# Altium footprint library aksima_footprint.PcbLib: 56 footprints (part 2 of 4)
Each footprint in its own frame and in the unit in brackets; x right, y up, seen from the top. Pads: shape width x height; smd on the part's side, far side on the other; paste and mask are expansions set on the pad; w line width, h text height; cw(c..) or ccw(c..) is an arc to the next point about the centre after c.
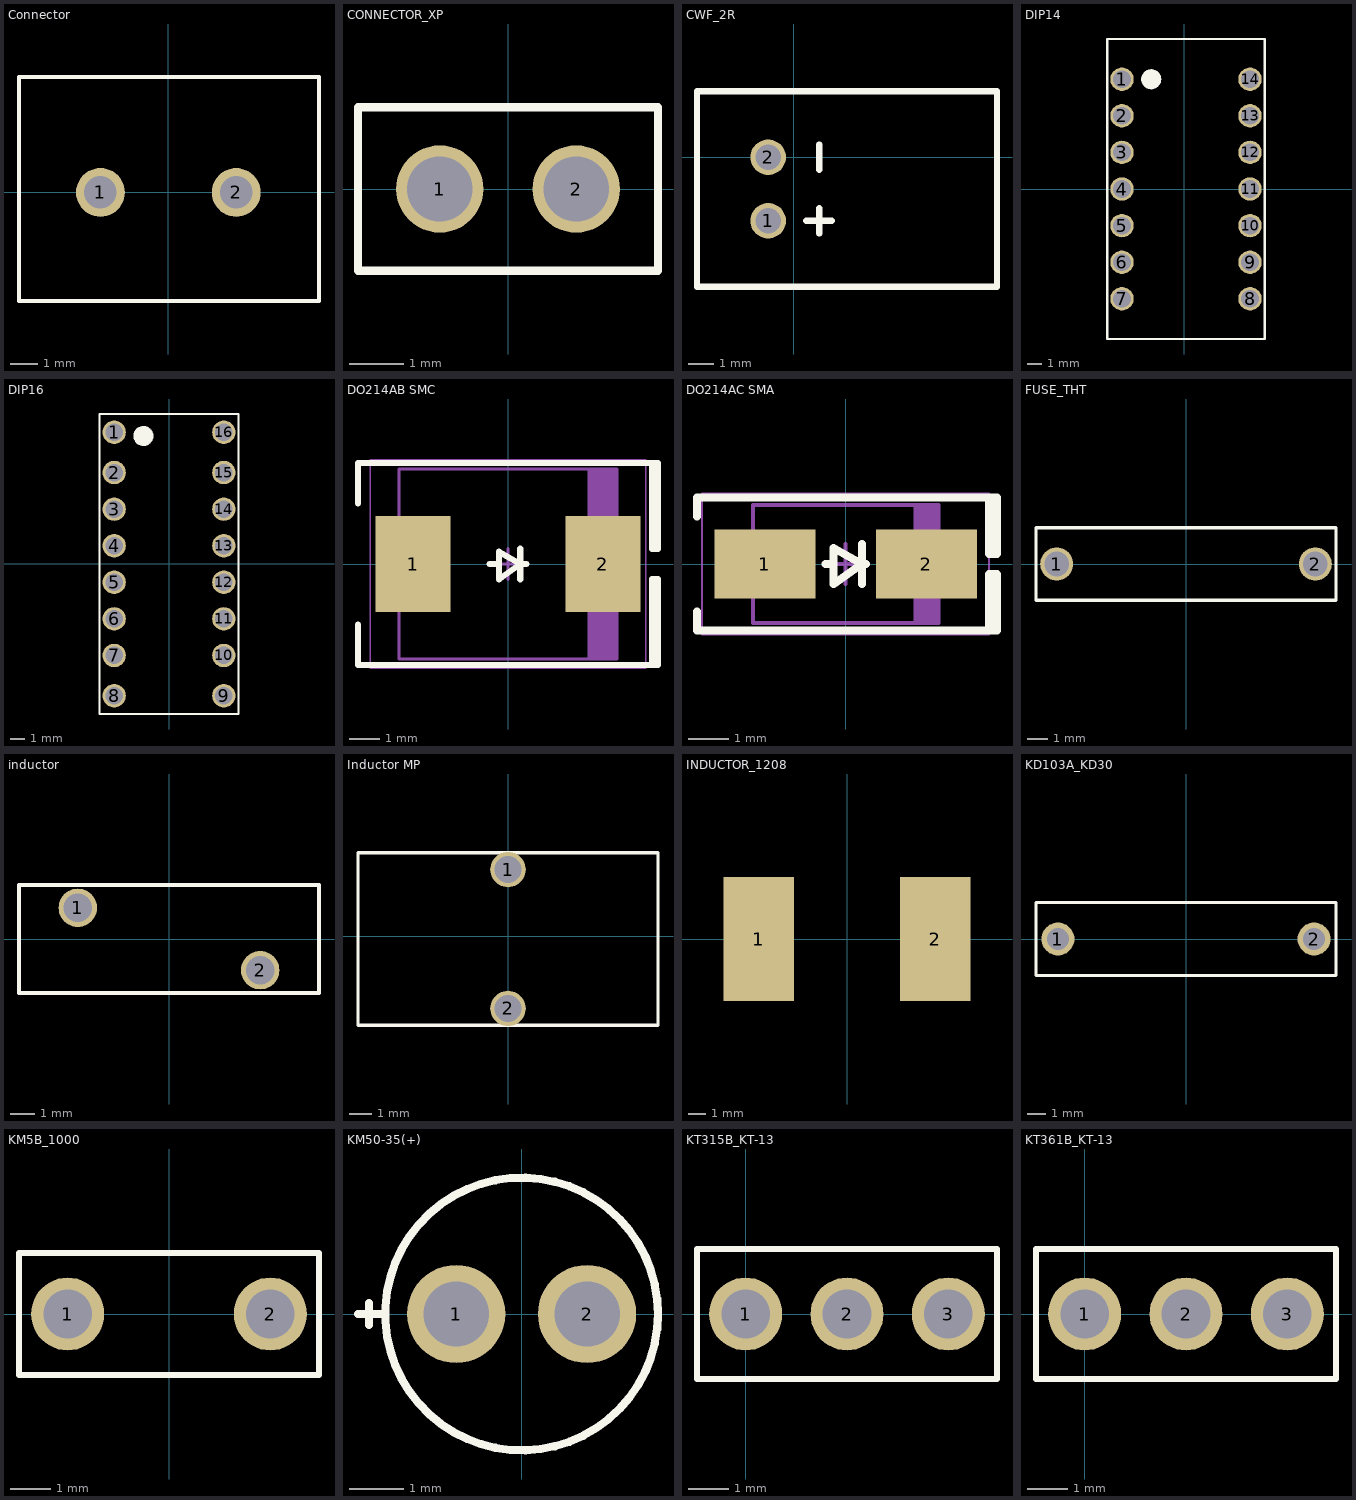
[diagram p1: the footprints below, top view; thin cyan lines are the x and y axes]

## Connector [mm] "Connector land pattern"
pads (2):
  round 1.8 hole 1.2: 1(-2.5,0) 2(2.5,0)
Top Overlay:
  lines w0.15: -5.5,-4 5.55,-4 5.55,4.25 -5.5,4.25 -5.5,-4
3D body "KF301-5-2P_blue.step": height 10.46, standoff -3.7, extent -5.15,-3.7 5.2,3.9

## CONNECTOR_XP [mm] "Connector plug land pattern"
pads (2):
  round 1.6 hole 1.2 unplated: 1(-1.25,0) 2(1.25,0)
Top Overlay:
  lines w0.15: -2.75,-1.5 2.75,-1.5 2.75,1.5 -2.75,1.5 -2.75,-1.5
3D body "PLS-2.step": height 9, standoff -2.5, extent -2.5,-1.202 2.55,1.202

## CWF_2R [mm] "CWF-2R two-position connector"
pads (2):
  round 1.4 hole 1: 1(-1,-2.5) 2(-1,0)
Top Overlay:
  lines w0.254: 0.5,-2.5 1.5,-2.5 ; 1,-3 1,-2 ; 1,-0.5 1,0.5 ; -3.8,-5.1 8,-5.1 8,2.6 -3.8,2.6 -3.8,-5.1
3D body "DS1069-2 CWF-2R.stp": height 5.75, standoff -3.5, extent -3.62,-5 7.88,2.5

## DIP14 [mm] "14-pin dual in-line IC"
pads (14):
  round 1.6 hole 1.2 unplated: 1(-4.25,7.5) 2(-4.25,5) 3(-4.25,2.5) 4(-4.25,0) 5(-4.25,-2.5) 6(-4.25,-5) 7(-4.25,-7.5) 8(4.5,-7.5) 9(4.5,-5) 10(4.5,-2.5) 11(4.5,0) 12(4.5,2.5) 13(4.5,5) 14(4.5,7.5)
Top Overlay:
  circle w0.254: c-2.25,7.5 r0.559
  rectangle: -2.75,7 -1.75,8
  rectangle: -2.5,7.25 -2,7.75
  lines w0.15: -5.25,-10.25 5.5,-10.25 5.5,10.25 -5.25,10.25 -5.25,7.5 -5.25,-10.25
3D body "DIP14.STEP": height 3.51, standoff -2.69, extent -4.66,-9.97 5,9.97

## DIP16 [mm] "16-pin dual in-line IC"
pads (16):
  round 1.6 hole 1.2 unplated: 1(-3.75,9) 2(-3.75,6.25) 3(-3.75,3.75) 4(-3.75,1.25) 5(-3.75,-1.25) 6(-3.75,-3.75) 7(-3.75,-6.25) 8(-3.75,-9) 9(3.75,-9) 10(3.75,-6.25) 11(3.75,-3.75) 12(3.75,-1.25) 13(3.75,1.25) 14(3.75,3.75) 15(3.75,6.25) 16(3.75,9)
Top Overlay:
  circle w0.254: c-1.75,8.75 r0.559
  rectangle: -2.25,8.25 -1.25,9.25
  lines w0.15: -4.75,-10.25 4.75,-10.25 4.75,10.25 -4.75,10.25 -4.75,-10.25
3D body "DIP16.STEP": height 4.7, standoff -2.6, extent -3.935,-9.98 3.935,9.98

## DO214AB SMC [mm] "Molded Diode, 2-Leads, Body 6.85x5.90mm, IPC Medium Density"
height 2.62
pads (2):
  rect 2.45x3.15 smd: 1(-3.1,0) 2(3.1,0)
Top Overlay:
  lines w0.2: -4.9,-1.975 -4.9,-3.3 4.9,-3.3 4.9,-0.5 4.7,-0.5 4.7,-3.3 ; -4.9,1.975 -4.9,3.3 4.9,3.3 4.9,0.5 4.7,0.5 4.7,3.3 ; -0.6,0 -0.3,0 ; 0.4,-0.5 0.4,0.5 ; 0.6,0 0.4,0 ; 0.4,0 -0.3,-0.5 -0.3,0.4 0.4,0
Mechanical 13:
  rectangle: 2.599,-3.11 3.555,3.11
  lines w0.1: -3.555,-3.11 3.555,-3.11 3.555,3.11 -3.555,3.11 -3.555,-3.11
Mechanical 15:
  lines w0.05: -4.5,-3.4 4.5,-3.4 4.5,3.4 -4.5,3.4 -4.5,-3.4
  lines w0.1: -0.5,0 0.5,0 ; 0,-0.5 0,0.5
3D body "SMC.STEP": height 2.6, standoff 0, extent -3.97,-2.952 3.97,2.952

## DO214AC SMA [mm] "Molded Diode, 2-Leads, Body 4.30x2.60mm, IPC Medium Density"
height 2.4
pads (2):
  rect 2.5x1.7 smd: 1(-2,0) 2(2,0)
Top Overlay:
  lines w0.2: -3.683,-1.175 -3.683,-1.651 3.75,-1.651 3.75,-0.254 3.556,-0.254 3.556,-1.651 ; -3.683,1.175 -3.683,1.651 3.75,1.651 3.75,0.254 3.556,0.254 3.556,1.651 ; -0.5,0 -0.3,0 ; 0.4,-0.5 0.4,0.5 ; 0.5,0 0.4,0 ; 0.4,0 -0.3,-0.5 -0.3,0.4 0.4,0
Mechanical 13:
  rectangle: 1.681,-1.46 2.3,1.46
  lines w0.1: -2.3,-1.46 2.3,-1.46 2.3,1.46 -2.3,1.46 -2.3,-1.46
Mechanical 15:
  lines w0.05: -3.556,-1.75 3.556,-1.75 3.556,1.75 -3.556,1.75 -3.556,-1.75
  lines w0.1: -0.5,0 0.5,0 ; 0,-0.5 0,0.5
3D body "SMA.STEP": height 2.4, standoff 0, extent -2.6,-1.375 2.6,1.375

## FUSE_THT [mm] "Through-hole fuse"
pads (2):
  round 1.6 hole 1.2: 1(-6.25,0) 2(6.25,0)
Top Overlay:
  lines w0.15: -7.25,-1.75 7.25,-1.75 7.25,1.75 7,1.75 -7.25,1.75 -7.25,0 -7.25,-1.75
3D body "4-4.STEP": height 2.49, standoff -3, extent -6.55,-1.5 6.55,1.5

## inductor [mm] "inductor footprint"
pads (2):
  round 1.6 hole 1.2: 1(-3.8,1.3) 2(3.8,-1.3)
Top Overlay:
  lines w0.15: -6.25,-2.25 -6.25,2.25 6.25,2.25 6.25,-2.25 -6.25,-2.25
3D body "inductor p7.77mm.stp": height 3.35, standoff -2.85, extent -6.15,-1.6 6.15,1.6

## Inductor MP [mm] "Inductor footprint, MP library variant"
pads (2):
  round 1.6 hole 1.2: 1(0,3) 2(0,-3.25)
Top Overlay:
  lines w0.15: -6.75,-4 6.75,-4 6.75,3.75 -6.75,3.75 -6.75,3.5 -6.75,-4
3D body "Toroidal inductor D13mm.stp": height 13.82, standoff -2, extent -6.619,-3.5 6.619,3.24

## INDUCTOR_1208 [mm] "1208-series surface-mount power inductor"
pads (2):
  rect 4x7 smd: 1(-5,0) 2(5,0)
3D body "L_12x12mm_H8mm.step": height 7.46, standoff -0.1, extent -6,-6 6,6

## KD103A_KD30 [mm] "KD103A diode, KD30 package"
pads (2):
  round 1.8 hole 1.2: 1(-7,0) 2(7,0)
Top Overlay:
  lines w0.15: -8.2,-2 8.2,-2 8.2,2 -8.2,2 -8.2,-2
3D body "User Library-KD29-C.STEP": height 5.82, standoff -1, extent -7.675,-1.818 7.675,1.818

## KM5B_1000 [mm] "Ceramic capacitor, KM5B series"
pads (2):
  round 1.8 hole 1.2: 1(-2.5,0) 2(2.5,0)
Top Overlay:
  lines w0.15: -3.7,-1.5 -3.7,1.5 3.7,1.5 3.7,-1.5 -3.7,-1.5
3D body "820pf MLCC Ceramic Capacitor.SLDPRT": height 7.5, standoff -7, extent -2.788,-1.251 2.788,1.251

## KM50-35(+) [mm] "Polarized capacitor, KM50-35 series"
pads (2):
  round 1.8 hole 1.2: 1(-1.2,0) 2(1.2,0)
Top Overlay:
  circle w0.15: c0,0 r2.5
  lines w0.15: -3,0 -2.5,0 ; -2.8,-0.2 -2.8,0.2
3D body "ElCapVT-2.0-5x7.step": height 7, standoff -3, extent -2.501,-2.499 2.5,2.499

## KT315B_KT-13 [mm] "NPN transistor, KT315B, KT-13 package"
pads (3):
  round 1.8 hole 1.2: 1(0,0) 2(2.5,0) 3(5,0)
Top Overlay:
  lines w0.15: -1.2,-1.6 6.2,-1.6 6.2,1.6 -1.2,1.6 -1.2,-1.6
3D body "KT-13_1.STEP": height 9, standoff -2, extent -1.1,-1.5 6.1,1.5

## KT361B_KT-13 [mm] "PNP transistor, KT361B, KT-13 package"
pads (3):
  round 1.8 hole 1.2: 1(0,0) 2(2.5,0) 3(5,0)
Top Overlay:
  lines w0.15: -1.2,-1.6 6.2,-1.6 6.2,1.6 -1.2,1.6 -1.2,-1.6
3D body "KT-13_1.STEP": height 9, standoff -2, extent -1.1,-1.5 6.1,1.5